# Altium schematic symbol library SMD-RES-20K-1_-1_10W(0603).SchLib: 1 symbol
Pins are listed as number, name and electrical type; pins without a type are passive.

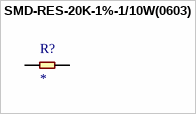
[diagram p0: symbol SMD-RES-20K-1%-1/10W(0603)]

## SMD-RES-20K-1%-1/10W(0603)
designator R?
20 kOhms Â±1% 0.1W, 1/10W Chip Resistor 0603 (1608 Metric) Moisture Resistant Thick Film; MF: Yageo; MP: RC0603FR-0720KL; SnapEDA_Link: https://www.snapeda.com/parts/RC0603FR-0720KL/Yageo/view-part/?ref=snap; Package: 0603 Yageo; Value: *; Check_prices: https://www.snapeda.com/parts/RC0603FR-0720KL/Yageo/view-part/?ref=eda
footprint R0603
pins: 1, 2